# Altium footprint library PBL - THD Packages.PcbLib: 160 footprints (part 2 of 10)
Each footprint in its own frame and in the unit in brackets; x right, y up, seen from the top. Pads: shape width x height; smd on the part's side, far side on the other; paste and mask are expansions set on the pad; w line width, h text height; cw(c..) or ccw(c..) is an arc to the next point about the centre after c.
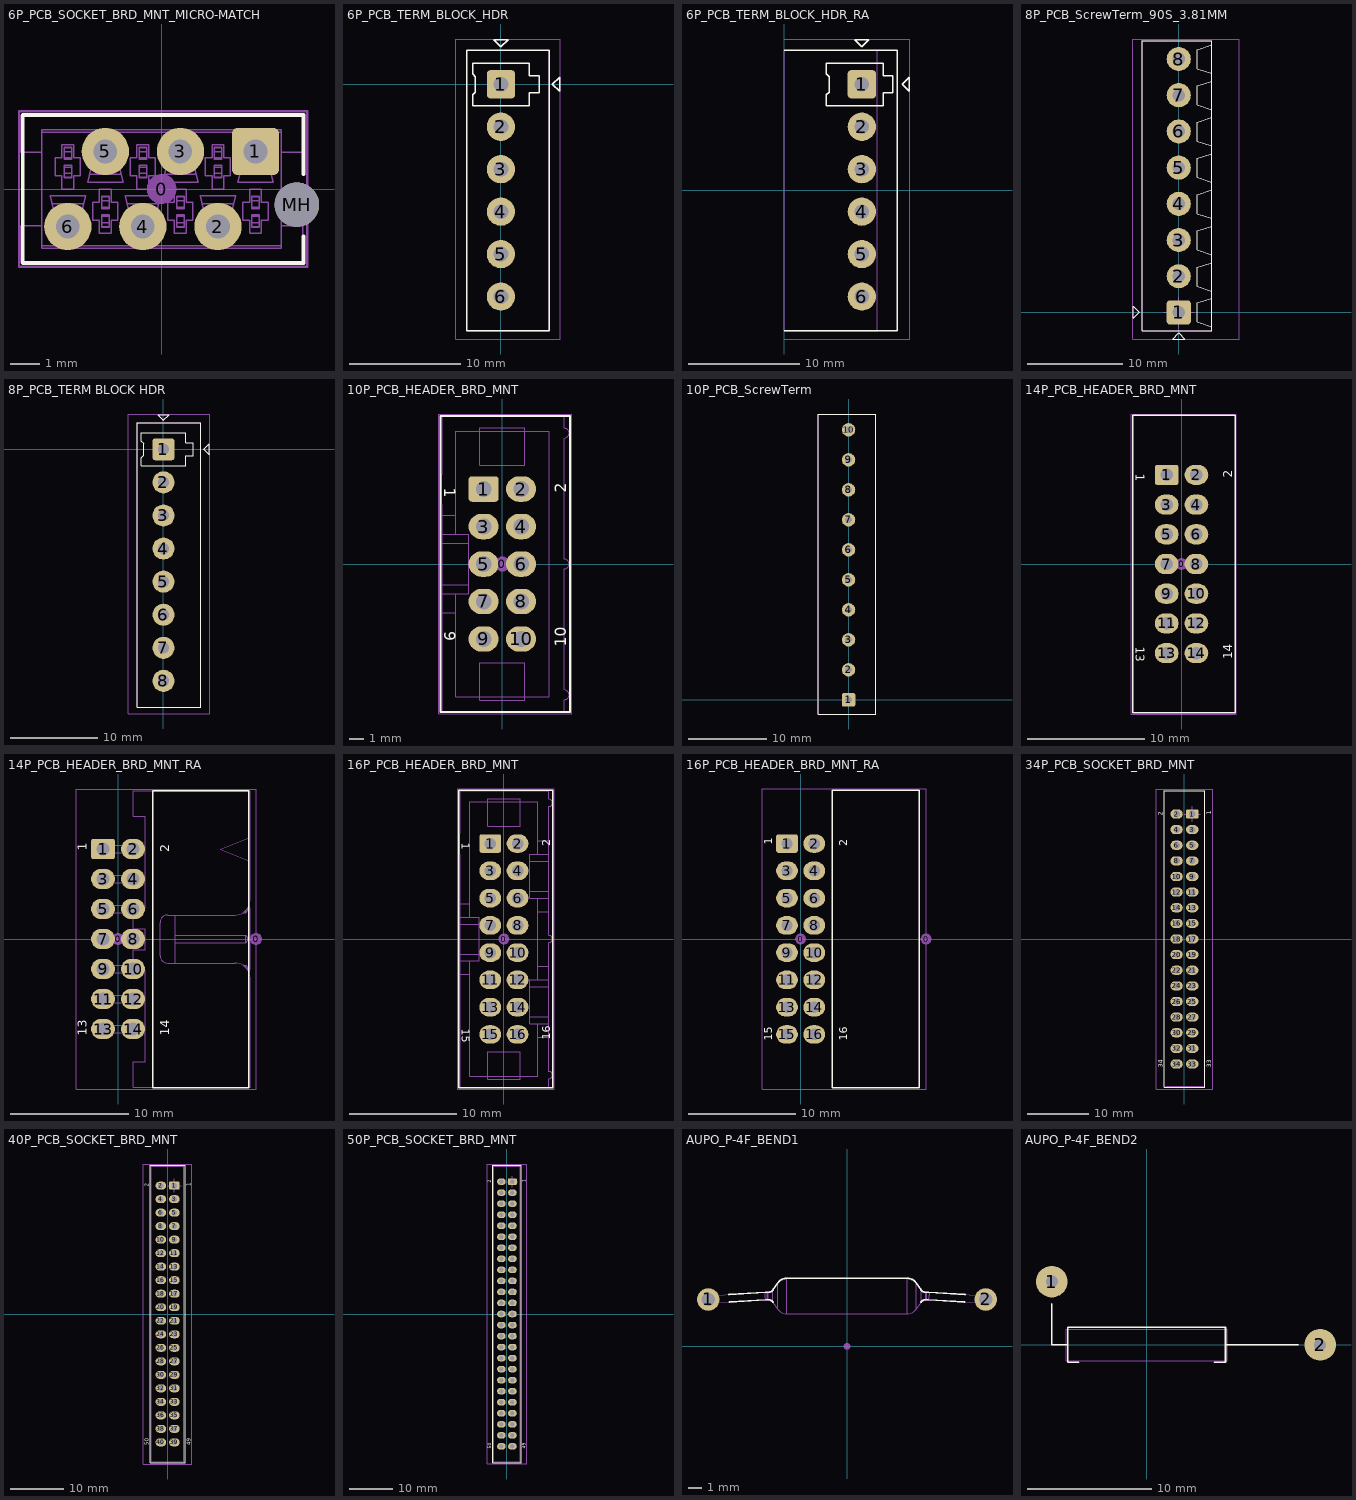
[diagram p1: the footprints below, top view; thin cyan lines are the x and y axes]

## 6P_PCB_SOCKET_BRD_MNT_MICRO-MATCH [mm] "SOCKET MICRO-MATCH BRD MNT 6POS 2.54MM"
height 4.2
pads (8):
  round 1.016 on Mech15: 0(0,0)
  rrect25% 1.6x1.6 hole 0.8: 1(3.175,1.27)
  round 1.6 hole 0.8: 2(1.905,-1.27) 3(0.635,1.27) 4(-0.635,-1.27) 5(-1.905,1.27) 6(-3.175,-1.27)
  round 1.5 hole 1.5 unplated: MH(4.575,-0.53)
Top Overlay:
  lines w0.127: 4.8,-1.6 4.8,-2.5 -4.7,-2.5 -4.7,2.5 4.8,2.5 4.8,0.5
13 - 3D Top Side:
  drawing of 280 lines, arcs and shapes, not listed
15 - Top Courtyards:
  lines w0.076: -4.827,-2.627 4.927,-2.627 4.927,2.627 -4.827,2.627 -4.827,-2.627
3D body: height 4, standoff -3, extent -4.775,-2.5 4.775,2.5

## 6P_PCB_TERM_BLOCK_HDR [mil] "TERM BLOCK HDR 6POS 3.81MM"
height 362.2
pads (6):
  rrect25% 100x100 hole 52: 1(0,0)
  round 100 hole 52: 2(0,-150) 3(0,-300) 4(0,-450) 5(0,-600) 6(0,-750)
Top Overlay:
  lines w5: -120,-870 -120,120 170,120 170,-870 -120,-870 ; -100,-75 -100,-37.5 -90,-27.5 -90,27.5 -100,37.5 -100,75 100,75 100,30 135,30 135,-30 100,-30 100,-75 -100,-75 ; -25,157 25,157 0,132 -25,157 ; 182,0 207,-25 207,25 182,0
13 - 3D Top Side:
  lines w3: -120,-870 170,-870 170,120 -120,120 -120,-870
15 - Top Courtyards:
  lines w3: -160,-900 -160,160 210,160 210,-900 -160,-900
3D body: height 362.2, standoff 0, extent -120,-870 170,120
3D body: height 362.8, standoff -133.26, extent -118.11,-870.07 167.33,120.08

## 6P_PCB_TERM_BLOCK_HDR_RA [mil] "TERM BLOCK HDR 6POS 3.81MM RIGHT-ANGLE"
height 362.2
pads (6):
  rrect25% 100x100 hole 52: 1(275,375)
  round 100 hole 52: 2(275,225) 3(275,75) 4(275,-75) 5(275,-225) 6(275,-375)
Top Overlay:
  lines w5: 0,-495 400,-495 400,495 0,495 ; 150,300 350,300 350,345 385,345 385,405 350,405 350,450 150,450 150,412.5 160,402.5 160,347.5 150,337.5 150,300 ; 250,532 275,507 300,532 250,532 ; 417,375 442,400 442,350 417,375
13 - 3D Top Side:
  lines w3: 0,-495 0,495 330,495 330,-495 0,-495
15 - Top Courtyards:
  lines w3: 0,-525 445,-525 445,535 0,535
3D body: height 288, standoff -133.26, extent -40,-495.08 322.2,495.08

## 8P_PCB_ScrewTerm_90S_3.81MM [mil] "TERM BLOCK 8POS SIDE ENT STACKABLE 3.81MM"
height 334.65
pads (8):
  rrect25% 100x100 hole 52: 1(0,0)
  round 100 hole 52: 2(0,150) 3(0,300) 4(0,450) 5(0,600) 6(0,750) 7(0,900) 8(0,1050)
Top Overlay:
  lines w5: 135.83,-59.06 76.78,-39.37 76.78,39.37 135.83,59.06 ; 135.83,88.58 76.78,108.27 76.78,187.01 135.83,206.69 ; 135.83,240 76.78,259.69 76.78,338.43 135.83,358.11 ; 135.83,390 76.78,409.69 76.78,488.43 135.83,508.11 ; 135.83,540 76.78,559.68 76.78,638.43 135.83,658.11 ; 135.83,690 76.78,709.68 76.78,788.43 135.83,808.11 ; 135.83,840 76.78,859.68 76.78,938.43 135.83,958.11 ; 135.83,990 76.78,1009.68 76.78,1088.43 135.83,1108.11 ; -188,-25 -163,0 -188,25 -188,-25 ; -151.57,-75 -151.57,1125 135.83,1125 135.83,-75 -151.57,-75 ; -25,-110 25,-110 0,-85 -25,-110
13 - 3D Top Side:
  lines w3: -151.57,-75 135.83,-75 135.83,1125 -151.57,1125 -151.57,-75
15 - Top Courtyards:
  lines w3: -65,0 65,0 ; 0,-65 0,65 ; -190,-110 -190,1132.88 250,1132.88 250,-110 -190,-110
3D body: height 335.25, standoff -137.2, extent -151.57,-75 135.83,1125

## 8P_PCB_TERM BLOCK HDR [mil] "TERM BLOCK HDR 8POS 3.81MM"
height 362.2
pads (8):
  rrect25% 100x100 hole 52: 1(0,0)
  round 100 hole 52: 2(0,-150) 3(0,-300) 4(0,-450) 5(0,-600) 6(0,-750) 7(0,-900) 8(0,-1050)
Top Overlay:
  lines w5: -120,-1170 170,-1170 170,120 -120,120 -120,-1170 ; -100,-75 100,-75 100,-30 135,-30 135,30 100,30 100,75 -100,75 -100,37.5 -90,27.5 -90,-27.5 -100,-37.5 -100,-75 ; -25,157 0,132 25,157 -25,157 ; 182,0 207,25 207,-25 182,0
13 - 3D Top Side:
  lines w3: -120,-1170 -120,120 170,120 170,-1170 -120,-1170
15 - Top Courtyards:
  lines w3: -160,-1200 210,-1200 210,160 -160,160 -160,-1200
3D body: height 362.8, standoff -133.26, extent -118.11,-1170.07 167.33,120.08
3D body: height 362.2, standoff 0, extent -120,-1170 170,120

## 10P_PCB_HEADER_BRD_MNT [mil] "HEADER BRD MNT 10POS 2.54MM"
height 390
pads (11):
  round 40 on Mech15: 0(0,0)
  rrect25% 80x68 hole 42: 1(-50,200)
  oval 80x68 hole 42: 2(50,200) 3(-50,100) 4(50,100) 5(-50,0) 6(50,0) 7(-50,-100) 8(50,-100) 9(-50,-200) 10(50,-200)
Top Overlay:
  lines w5: -165,-395 180,-395 180,395 -165,395 -165,-395
  text "9" at -155,-179 h30
  text "10" at 170,-220.28 h30
  text "1" at -155,203.57 h30
  text "2" at 170,190 h30
13 - 3D Top Side:
  drawing of 154 lines, arcs and shapes, not listed
15 - Top Courtyards:
  lines w3: -170,-400 185,-400 185,400 -170,400 -170,-400
3D body: height 390, standoff -120, extent -161.99,-393.99 178.01,394.01

## 10P_PCB_ScrewTerm [mm] "TERM BLOCK 10POS SIDE ENT 3.81MM"
height 8.5
pads (10):
  rrect25% 1.7x1.7 hole 0.85: 1(0,0)
  round 1.7 hole 0.85: 2(0,3.81) 3(0,7.62) 4(0,11.43) 5(0,15.24) 6(0,19.05) 7(0,22.86) 8(0,26.67) 9(0,30.48) 10(0,34.29)
Top Overlay:
  lines w0.127: -3.85,-1.8 3.45,-1.8 3.45,36.3 -3.85,36.3 -3.85,-1.8
13 - 3D Top Side:
  lines w0.076: -3.85,-1.8 -3.85,36.3 3.45,36.3 3.45,-1.8 -3.85,-1.8
3D body: height 8.5, standoff 0, extent -3.85,-1.8 3.45,36.3

## 14P_PCB_HEADER_BRD_MNT [mil] "HEADER BRD MNT 14POS 2.54MM"
height 390
pads (15):
  round 40 on Mech15: 0(0,0)
  rrect25% 80x68 hole 42: 1(-50,300)
  oval 80x68 hole 42: 2(50,300) 3(-50,200) 4(50,200) 5(-50,100) 6(50,100) 7(-50,0) 8(50,0) 9(-50,-100) 10(50,-100) 11(-50,-200) 12(50,-200) 13(-50,-300) 14(50,-300)
Top Overlay:
  lines w5: -165,-500 180,-500 180,500 -165,500 -165,-500
  text "13" at -155,-279 h30
  text "14" at 170,-320.28 h30
  text "1" at -155,303.57 h30
  text "2" at 170,290 h30
15 - Top Courtyards:
  lines w3: -170,-505 185,-505 185,505 -170,505 -170,-505
3D body: height 390, standoff -120, extent -161.99,-493.99 178.01,494.01

## 14P_PCB_HEADER_BRD_MNT_RA [mil] "HEADER BRD MNT R/A 14POS 2.54MM"
height 338
pads (16):
  round 40 on Mech15: 0(0,0) 0(460,0)
  rrect25% 80x68 hole 42: 1(-50,300)
  oval 80x68 hole 42: 2(50,300) 3(-50,200) 4(50,200) 5(-50,100) 6(50,100) 7(-50,0) 8(50,0) 9(-50,-100) 10(50,-100) 11(-50,-200) 12(50,-200) 13(-50,-300) 14(50,-300)
Top Overlay:
  lines w5: 115,-495 435,-495 435,495 115,495 115,-495
  text "13" at -105,-323 h30
  text "14" at 170,-323 h30
  text "1" at -105,295 h30
  text "2" at 170,290 h30
13 - 3D Top Side:
  lines w1.97: -17.5,-312.25 -17.5,-287.75 ; -17.5,-212.25 -17.5,-187.75 ; -17.5,-112.25 -17.5,-87.75 ; -17.5,-12.25 -17.5,12.25 ; -17.5,87.75 -17.5,112.25 ; -17.5,187.75 -17.5,212.25 ; -17.5,287.75 -17.5,312.25 ; 50,-87.75 -62.5,-87.75 -62.5,-112.25 90,-112.25 ; 50,87.75 -62.5,87.75 -62.5,112.25 90,112.25 ; 90,-312.25 -62.5,-312.25 -62.5,-287.75 90,-287.75 ; 90,-212.25 -62.5,-212.25 -62.5,-187.75 90,-187.75 ; 90,-12.25 -62.5,-12.25 -62.5,12.25 90,12.25 ; 90,187.75 -62.5,187.75 -62.5,212.25 90,212.25 ; 90,287.75 -62.5,287.75 -62.5,312.25 90,312.25 ; 190,-80 190,80 ; 190,-12.25 425,-12.25 ; 190,12.25 425,12.25 ; 416.74,-87.75 425,-87.75 ; 416.74,87.75 425,87.75 ; 425,-94.29 425,-87.75 ; 425,94.29 425,87.75 ; 433,-104.25 433,-95.75 425,-87.75 ; 433,104.25 433,95.75 425,87.75 ; 437.7,-115 ccw(c390,-100) 440,-100 440,100 ccw(c390,100) 437.7,115 ; 440,260 340,300 440,340 ; 425,-12.25 433,-4.25 433,4.25 425,12.25 ; 425,-12.25 425,12.25 ; 50,-494 50,-409 90,-409 90,-105 50,-105 50,-35 90,-35 90,35 50,35 50,105 90,105 90,409 50,409 50,494 440,494 440,130 cw(c390,130) 390,80 165,80 ccw(c165,55) 140,55 140,-55 ccw(c165,-55) 165,-80 390,-80 cw(c390,-130) 440,-130 440,-494 50,-494
15 - Top Courtyards:
  lines w3: -140,-500 460,-500 460,500 -140,500 -140,-500
3D body: height 340, standoff -112, extent -62.49,-493.99 440.01,494.01

## 16P_PCB_HEADER_BRD_MNT [mil] "HEADER BRD MNT 16POS 2.54MM"
height 390
pads (17):
  round 40 on Mech15: 0(0,0)
  rrect25% 80x68 hole 42: 1(-50,350)
  oval 80x68 hole 42: 2(50,350) 3(-50,250) 4(50,250) 5(-50,150) 6(50,150) 7(-50,50) 8(50,50) 9(-50,-50) 10(50,-50) 11(-50,-150) 12(50,-150) 13(-50,-250) 14(50,-250) 15(-50,-350) 16(50,-350)
Top Overlay:
  lines w5: -165,-545 -165,545 180,545 180,-545 -165,-545
  text "2" at 170,340 h30
  text "1" at -155,353.57 h30
  text "16" at 170,-370.28 h30
  text "15" at -155,-329 h30
13 - 3D Top Side:
  drawing of 242 lines, arcs and shapes, not listed
15 - Top Courtyards:
  lines w3: -170,-550 -170,550 185,550 185,-550 -170,-550
3D body: height 390, standoff -120, extent -161.99,-543.99 178.01,544.01

## 16P_PCB_HEADER_BRD_MNT_RA [mil] "HEADER BRD MNT R/A 16POS 2.54MM"
height 338
pads (18):
  round 40 on Mech15: 0(0,0) 0(460,0)
  rrect25% 80x68 hole 42: 1(-50,350)
  oval 80x68 hole 42: 2(50,350) 3(-50,250) 4(50,250) 5(-50,150) 6(50,150) 7(-50,50) 8(50,50) 9(-50,-50) 10(50,-50) 11(-50,-150) 12(50,-150) 13(-50,-250) 14(50,-250) 15(-50,-350) 16(50,-350)
Top Overlay:
  lines w5: 115,-545 435,-545 435,545 115,545 115,-545
  text "15" at -105,-373 h30
  text "16" at 170,-373 h30
  text "1" at -105,345 h30
  text "2" at 170,340 h30
15 - Top Courtyards:
  lines w3: -140,-550 460,-550 460,550 -140,550 -140,-550
3D body: height 340, standoff -112, extent -62.24,-543.99 440.01,544.01

## 34P_PCB_SOCKET_BRD_MNT [mm] "SOCKET BRD MNT 34POS 2.54MM"
height 10.8
pads (34):
  rrect25% 2x1.5 hole 1.067: 1(1.27,20.32)
  oval 2x1.5 hole 1.067: 2(-1.27,20.32) 3(1.27,17.78) 4(-1.27,17.78) 5(1.27,15.24) 6(-1.27,15.24) 7(1.27,12.7) 8(-1.27,12.7) 9(1.27,10.16) 10(-1.27,10.16) 11(1.27,7.62) 12(-1.27,7.62) 13(1.27,5.08) 14(-1.27,5.08) 15(1.27,2.54) 16(-1.27,2.54) 17(1.27,0) 18(-1.27,0) 19(1.27,-2.54) 20(-1.27,-2.54) 21(1.27,-5.08) 22(-1.27,-5.08) 23(1.27,-7.62) 24(-1.27,-7.62) 25(1.27,-10.16) 26(-1.27,-10.16) 27(1.27,-12.7) 28(-1.27,-12.7) 29(1.27,-15.24) 30(-1.27,-15.24) 31(1.27,-17.78) 32(-1.27,-17.78) 33(1.27,-20.32) 34(-1.27,-20.32)
Top Overlay:
  lines w0.127: -3.302,-24.13 -3.302,24.13 3.302,24.13 3.302,-24.13 -3.302,-24.13
  text "1" at 4.318,20.193 h0.76
  text "2" at -3.556,20.066 h0.76
  text "33" at 4.318,-20.904 h0.76
  text "34" at -3.556,-20.904 h0.76
13 - 3D Top Side:
  lines w0.076: -3.05,-23.92 3.05,-23.92
15 - Top Courtyards:
  lines w0.076: 0,20.32 2.54,20.32 ; 1.27,19.05 1.27,21.59 ; -4.572,-24.384 -4.572,24.384 4.572,24.384 4.572,-24.384 -4.572,-24.384
3D body: height 10.8, standoff -2.8, extent -3.05,-23.925 4.05,23.915

## 40P_PCB_SOCKET_BRD_MNT [mm] "SOCKET BRD MNT 40POS 2.54MM"
height 10.8
pads (40):
  rrect25% 2x1.5 hole 1.067: 1(1.27,24.13)
  oval 2x1.5 hole 1.067: 2(-1.27,24.13) 3(1.27,21.59) 4(-1.27,21.59) 5(1.27,19.05) 6(-1.27,19.05) 7(1.27,16.51) 8(-1.27,16.51) 9(1.27,13.97) 10(-1.27,13.97) 11(1.27,11.43) 12(-1.27,11.43) 13(1.27,8.89) 14(-1.27,8.89) 15(1.27,6.35) 16(-1.27,6.35) 17(1.27,3.81) 18(-1.27,3.81) 19(1.27,1.27) 20(-1.27,1.27) 21(1.27,-1.27) 22(-1.27,-1.27) 23(1.27,-3.81) 24(-1.27,-3.81) 25(1.27,-6.35) 26(-1.27,-6.35) 27(1.27,-8.89) 28(-1.27,-8.89) 29(1.27,-11.43) 30(-1.27,-11.43) 31(1.27,-13.97) 32(-1.27,-13.97) 33(1.27,-16.51) 34(-1.27,-16.51) 35(1.27,-19.05) 36(-1.27,-19.05) 37(1.27,-21.59) 38(-1.27,-21.59) 39(1.27,-24.13) 40(-1.27,-24.13)
Top Overlay:
  lines w0.127: -3.302,-27.94 3.302,-27.94 3.302,27.94 -3.302,27.94 -3.302,-27.94
  text "1" at 4.318,24.003 h0.76
  text "2" at -3.556,23.876 h0.76
  text "49" at 4.318,-24.714 h0.76
  text "50" at -3.556,-24.714 h0.76
13 - 3D Top Side:
  lines w0.076: -3.05,-27.73 -3.05,27.73 3.05,27.73 3.05,-27.73 -3.05,-27.73
15 - Top Courtyards:
  lines w0.076: 0,24.13 2.54,24.13 ; 1.27,22.86 1.27,25.4 ; -4.572,-28.194 4.572,-28.194 4.572,28.194 -4.572,28.194 -4.572,-28.194
3D body: height 10.8, standoff -2.54, extent -3.05,-27.73 4.05,27.73

## 50P_PCB_SOCKET_BRD_MNT [mm] "SOCKET BRD MNT 50POS 2.54MM"
height 10.8
pads (50):
  rrect25% 2x1.5 hole 1.067: 1(1.27,30.48)
  oval 2x1.5 hole 1.067: 2(-1.27,30.48) 3(1.27,27.94) 4(-1.27,27.94) 5(1.27,25.4) 6(-1.27,25.4) 7(1.27,22.86) 8(-1.27,22.86) 9(1.27,20.32) 10(-1.27,20.32) 11(1.27,17.78) 12(-1.27,17.78) 13(1.27,15.24) 14(-1.27,15.24) 15(1.27,12.7) 16(-1.27,12.7) 17(1.27,10.16) 18(-1.27,10.16) 19(1.27,7.62) 20(-1.27,7.62) 21(1.27,5.08) 22(-1.27,5.08) 23(1.27,2.54) 24(-1.27,2.54) 25(1.27,0) 26(-1.27,0) 27(1.27,-2.54) 28(-1.27,-2.54) 29(1.27,-5.08) 30(-1.27,-5.08) 31(1.27,-7.62) 32(-1.27,-7.62) 33(1.27,-10.16) 34(-1.27,-10.16) 35(1.27,-12.7) 36(-1.27,-12.7) 37(1.27,-15.24) 38(-1.27,-15.24) 39(1.27,-17.78) 40(-1.27,-17.78) 41(1.27,-20.32) 42(-1.27,-20.32) 43(1.27,-22.86) 44(-1.27,-22.86) 45(1.27,-25.4) 46(-1.27,-25.4) 47(1.27,-27.94) 48(-1.27,-27.94) 49(1.27,-30.48) 50(-1.27,-30.48)
Top Overlay:
  lines w0.127: -3.302,-34.29 3.302,-34.29 3.302,34.29 -3.302,34.29 -3.302,-34.29
  text "1" at 4.318,30.353 h0.76
  text "2" at -3.556,30.226 h0.76
  text "49" at 4.318,-31.064 h0.76
  text "50" at -3.556,-31.064 h0.76
13 - 3D Top Side:
  lines w0.076: -3.05,-34.08 -3.05,34.08 3.05,34.08 3.05,-34.08 -3.05,-34.08
15 - Top Courtyards:
  lines w0.076: 0,30.48 2.54,30.48 ; 1.27,29.21 1.27,31.75 ; -4.572,-34.544 4.572,-34.544 4.572,34.544 -4.572,34.544 -4.572,-34.544
3D body: height 10.8, standoff -2.8, extent -3.05,-34.085 4.05,34.075

## AUPO_P-4F_BEND1 [mil] "Aupo P-4F TCO for positioning on IC legs"
height 100
pads (3):
  round 19.68 on Mech15: 0(0,0)
  round 65 / inner round 65 / far side round 90 hole 38: 1(-400,135) 2(400,135)
Top Overlay:
  lines w5: -339.97,149.43 -235.55,155.67 -232.42,155.8 -230.32,155.83 -226.38,155.83 ccw(c-226.38,171.57) -213.48,162.54 -199.33,182.75 cw(c-173.53,164.69) -173.53,196.18 173.53,196.18 cw(c173.53,164.69) 199.33,182.75 213.48,162.54 ccw(c226.38,171.57) 226.38,155.83 230.32,155.83 233.46,155.77 235.55,155.67 340.26,149.42 ; -338.67,127.82 -234.26,134.06 -232.69,134.13 -230.32,134.17 -226.38,134.17 cw(c-226.38,118.43) -213.48,127.46 ; 213.48,127.46 cw(c226.38,118.43) 226.38,134.17 230.32,134.17 231.91,134.15 234.26,134.06 338.97,127.8
13 - 3D Top Side:
  lines w1.97: -381.43,146.96 ccw(c-360.21,137.38) -380.14,125.34 ; 380.14,125.34 ccw(c367.63,134.29) 382.82,136.67 382.89,139.15 382.84,141.46 382.68,143.49 382.42,145.12 382.08,146.27 381.66,146.87 381.43,146.96 ; -235.55,155.67 ccw(c-214.34,146.09) -234.26,134.06 ; -235.55,155.67 -400.65,145.81 ccw(c-400,135) -399.35,124.19 -234.26,134.06 ; -235.55,155.67 -232.42,155.8 -230.32,155.83 ; -234.26,134.06 -232.69,134.13 -230.32,134.17 ; -230.32,134.17 -230.32,155.83 ; -230.32,134.17 -226.38,134.17 ; -230.32,155.83 -226.38,155.83 ; -226.38,134.17 cw(c-226.38,118.43) -213.48,127.46 ; -226.38,134.17 -226.38,155.83 ; -226.38,155.83 ccw(c-226.38,171.57) -213.48,162.54 ; -213.48,127.46 -213.48,162.54 ; -213.48,127.46 -199.33,107.25 ; -213.48,162.54 -199.33,182.75 ; -199.33,107.25 ccw(c-173.53,125.31) -173.53,93.82 ; -199.33,107.25 -199.33,182.75 ; -199.33,182.75 cw(c-173.53,164.69) -173.53,196.18 ; -173.53,93.82 -173.53,196.18 ; -173.53,93.82 173.53,93.82 ; -173.53,196.18 173.53,196.18 ; 173.53,93.82 ccw(c173.53,125.31) 199.33,107.25 ; 173.53,93.82 173.53,196.18 ; 173.53,196.18 cw(c173.53,164.69) 199.33,182.75 ; 199.33,107.25 199.33,182.75 ; 199.33,107.25 213.48,127.46 ; 199.33,182.75 213.48,162.54 ; 213.48,127.46 cw(c226.38,118.43) 226.38,134.17 ; 213.48,127.46 213.48,162.54 ; 213.48,162.54 ccw(c226.38,171.57) 226.38,155.83 ; 226.38,134.17 226.38,155.83 ; 226.38,134.17 230.32,134.17 ; 226.38,155.83 230.32,155.83 ; 230.32,134.17 230.32,155.83 ; 230.32,134.17 231.91,134.15 234.26,134.06 ; 230.32,155.83 233.46,155.77 235.55,155.67 ; 234.26,134.06 ccw(c221.76,143) 236.94,145.39 237.01,147.87 236.96,150.18 236.8,152.21 236.54,153.84 236.19,154.98 235.77,155.59 235.55,155.67 ; 234.26,134.06 399.35,124.19 ccw(c400,135) 400.65,145.81 235.55,155.67
3D body: height 40, standoff 0, extent -444.64,90.1 -355,179.92
3D body: height 104.36, standoff -98, extent -410.74,93.93 410.83,196.09
3D body: height 40, standoff 0, extent 355.36,90.1 445,179.92

## AUPO_P-4F_BEND2 [mil] "Aupo P-4F TCO for positioning on IC legs"
height 100
pads (2):
  round 100 hole 38: 1(-300,200) 2(550,0)
Top Overlay:
  lines w5: -300,130 -300,0 -250,0 ; -215,-55 -250,-55 -250,55 250,55 250,-55 215,-55 ; 250,0 480,0
13 - 3D Top Side:
  lines w3: -255,-50 -255,49.8 255,49.8 255,-50 -255,-50
3D body: height 55, standoff -95, extent -310,190.02 -290.08,209.98
3D body: height 65, standoff 45.08, extent -309.98,-0.02 -290.02,199.98
3D body: height 65, standoff 45.08, extent -299.5,-9.96 -254.5,10
3D body: height 65, standoff 45.08, extent 250,-9.96 550,10
3D body: height 104.61, standoff 5, extent -255,-50 255,49.8
3D body: height 55, standoff -95, extent 540,-9.98 559.92,9.99
3D body: height 65, standoff 45, extent 540,-9.98 559.9,9.94
3D body: height 65, standoff 45, extent -310,190.02 -290.1,209.94
3D body: height 65, standoff 45, extent -310,-10 -290.1,9.91